# Altium footprint library asar_feather.PcbLib: 53 footprints (part 3 of 4)
Each footprint in its own frame and in the unit in brackets; x right, y up, seen from the top. Pads: shape width x height; smd on the part's side, far side on the other; paste and mask are expansions set on the pad; w line width, h text height; cw(c..) or ccw(c..) is an arc to the next point about the centre after c.
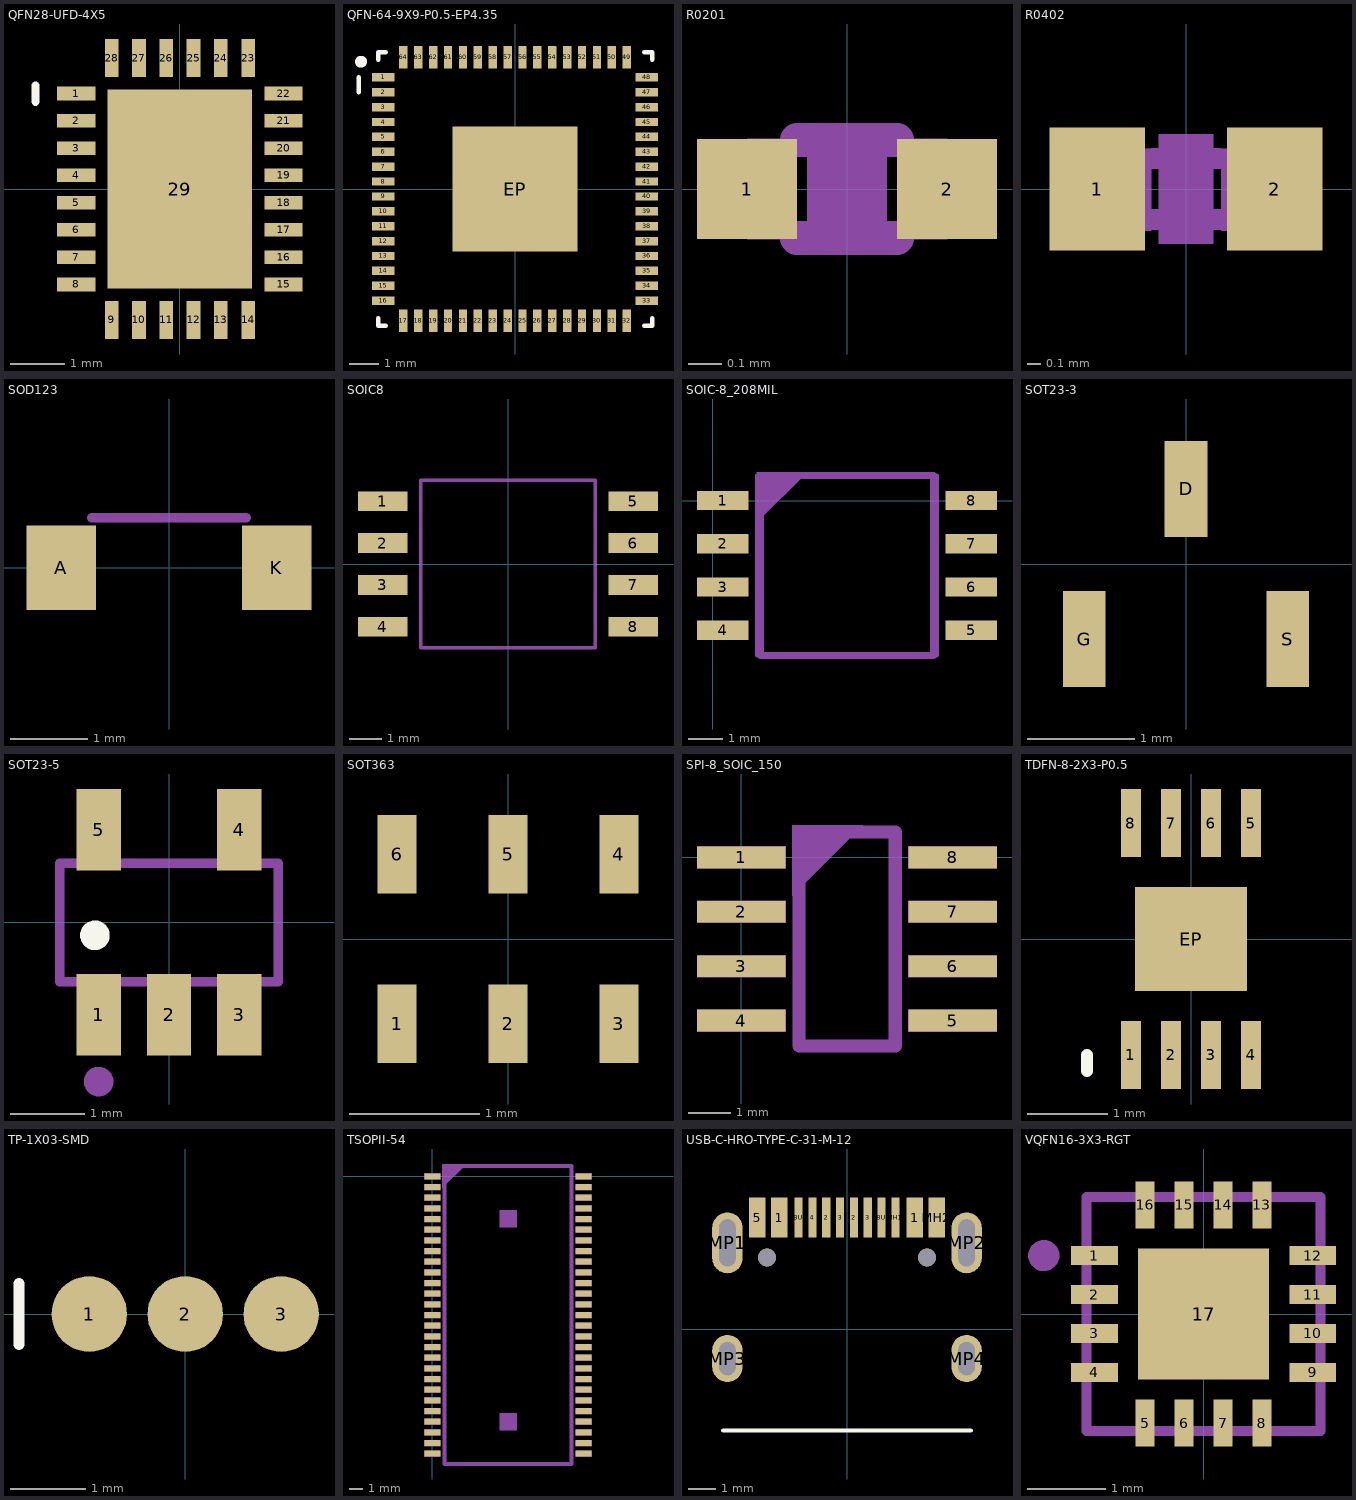
[diagram p2: the footprints below, top view; thin cyan lines are the x and y axes]

## QFN28-UFD-4X5 [mm] "UFD 28-lead QFN 4 x 5 mm, 0.5 pitch, exposed pad 2.65 x 3.65 (pad 29 = GND); LTC DWG 05-08-1712 Rev B recommended pads"
height 0.75
pads (29):
  rect 0.7x0.25 smd: 1(-1.9,1.75) 2(-1.9,1.25) 3(-1.9,0.75) 4(-1.9,0.25) 5(-1.9,-0.25) 6(-1.9,-0.75) 7(-1.9,-1.25) 8(-1.9,-1.75) 15(1.9,-1.75) 16(1.9,-1.25) 17(1.9,-0.75) 18(1.9,-0.25) 19(1.9,0.25) 20(1.9,0.75) 21(1.9,1.25) 22(1.9,1.75)
  rect 0.25x0.7 smd: 9(-1.25,-2.4) 10(-0.75,-2.4) 11(-0.25,-2.4) 12(0.25,-2.4) 13(0.75,-2.4) 14(1.25,-2.4) 23(1.25,2.4) 24(0.75,2.4) 25(0.25,2.4) 26(-0.25,2.4) 27(-0.75,2.4) 28(-1.25,2.4)
  rect 2.65x3.65 smd: 29(0,0)
Top Overlay:
  lines w0.15: -2.65,1.6 -2.65,1.9
3D body: height 0.8, standoff 0, extent -2,-2.5 2,2.5

## QFN-64-9X9-P0.5-EP4.35 [mm] "FT2232HQ QFN-64 9x9 mm 0.5 mm pitch, EP 4.35 mm"
pads (65):
  rect 0.75x0.28 smd: 1(-4.425,3.75) 2(-4.425,3.25) 3(-4.425,2.75) 4(-4.425,2.25) 5(-4.425,1.75) 6(-4.425,1.25) 7(-4.425,0.75) 8(-4.425,0.25) 9(-4.425,-0.25) 10(-4.425,-0.75) 11(-4.425,-1.25) 12(-4.425,-1.75) 13(-4.425,-2.25) 14(-4.425,-2.75) 15(-4.425,-3.25) 16(-4.425,-3.75) 33(4.425,-3.75) 34(4.425,-3.25) 35(4.425,-2.75) 36(4.425,-2.25) 37(4.425,-1.75) 38(4.425,-1.25) 39(4.425,-0.75) 40(4.425,-0.25) 41(4.425,0.25) 42(4.425,0.75) 43(4.425,1.25) 44(4.425,1.75) 45(4.425,2.25) 46(4.425,2.75) 47(4.425,3.25) 48(4.425,3.75)
  rect 0.28x0.75 smd: 17(-3.75,-4.425) 18(-3.25,-4.425) 19(-2.75,-4.425) 20(-2.25,-4.425) 21(-1.75,-4.425) 22(-1.25,-4.425) 23(-0.75,-4.425) 24(-0.25,-4.425) 25(0.25,-4.425) 26(0.75,-4.425) 27(1.25,-4.425) 28(1.75,-4.425) 29(2.25,-4.425) 30(2.75,-4.425) 31(3.25,-4.425) 32(3.75,-4.425) 49(3.75,4.425) 50(3.25,4.425) 51(2.75,4.425) 52(2.25,4.425) 53(1.75,4.425) 54(1.25,4.425) 55(0.75,4.425) 56(0.25,4.425) 57(-0.25,4.425) 58(-0.75,4.425) 59(-1.25,4.425) 60(-1.75,4.425) 61(-2.25,4.425) 62(-2.75,4.425) 63(-3.25,4.425) 64(-3.75,4.425)
  rect 4.2x4.2 smd: EP(0,0)
Top Overlay:
  circle w0.2: c-5.175,4.275 r0.1
  lines w0.15: -5.25,3.25 -5.25,3.75 ; -4.6,-4.34 -4.6,-4.6 -4.34,-4.6 ; -4.6,4.34 -4.6,4.6 -4.34,4.6 ; 4.34,-4.6 4.6,-4.6 4.6,-4.34 ; 4.34,4.6 4.6,4.6 4.6,4.34
3D body: height 0.9, standoff 0, extent -4.5,-4.5 4.5,4.5

## R0201 [mm] "R0201"
pads (2):
  rect 0.3x0.3 smd: 1(-0.3,0) 2(0.3,0)
Mechanical 3:
  region: -0.3,-0.15 -0.3,0.15 -0.15,0.15 -0.15,-0.15
  region: 0.15,-0.15 0.15,0.15 0.3,0.15 0.3,-0.15
  lines w0.102: -0.15,-0.147 0.15,-0.147 ; -0.15,0.147 0.15,0.147
Top Glue Points:
  region: -0.12,-0.15 -0.12,0.15 0.12,0.15 0.12,-0.15
3D body: height 0.26, standoff 0, extent -0.3,-0.15 0.3,0.15

## R0402 [mm] "R0402"
pads (2):
  rect 0.7x0.9 smd: 1(-0.65,0) 2(0.65,0)
Mechanical 4:
  region: -0.554,-0.305 -0.554,0.295 -0.254,0.295 -0.254,-0.305
  region: 0.259,-0.305 0.259,0.295 0.559,0.295 0.559,-0.305
  lines w0.152: -0.245,-0.224 0.245,-0.224 ; -0.245,0.224 0.245,0.224
Bottom Glue Points:
  region: -0.2,-0.4 -0.2,0.4 0.2,0.4 0.2,-0.4
3D body: height 0.4, standoff 0, extent -0.5,-0.25 0.5,0.25

## SOD123 [mm] "SOD123"
pads (2):
  rect 0.9x1.1 smd: A(-1.4,0) K(1.4,0)
Mechanical 8:
  lines w0.127: -1,0.65 1,0.65

## SOIC8 [mm] "SOIC8"
pads (8):
  rect 1.5x0.6 smd: 1(-3.81,1.905) 2(-3.81,0.635) 3(-3.81,-0.635) 4(-3.81,-1.905) 5(3.81,1.905) 6(3.81,0.635) 7(3.81,-0.635) 8(3.81,-1.905)
Mechanical 8:
  lines w0.1: -2.65,-2.55 2.65,-2.55 2.65,2.55 -2.65,2.55 -2.65,-2.55

## SOIC-8_208MIL [mm] "SOIC-8_208MIL"
pads (8):
  rect 1.51x0.56 smd: 1(0.299,0) 2(0.299,-1.27) 3(0.299,-2.54) 4(0.299,-3.81) 5(7.599,-3.81) 6(7.599,-2.54) 7(7.599,-1.27) 8(7.599,0)
Mechanical 4:
  region: -0.001,-0.21 -0.001,0.21 0.649,0.21 0.649,-0.21
  region: -0.001,-1.48 -0.001,-1.06 0.649,-1.06 0.649,-1.48
  region: -0.001,-2.75 -0.001,-2.33 0.649,-2.33 0.649,-2.75
  region: -0.001,-4.02 -0.001,-3.6 0.649,-3.6 0.649,-4.02
  region: 7.249,-4.02 7.249,-3.6 7.899,-3.6 7.899,-4.02
  region: 7.249,-2.75 7.249,-2.33 7.899,-2.33 7.899,-2.75
  region: 7.249,-1.48 7.249,-1.06 7.899,-1.06 7.899,-1.48
  region: 7.249,-0.21 7.249,0.21 7.899,0.21 7.899,-0.21
  lines w0.127: 1.31,-4.545 1.31,0.735 6.59,0.735 6.59,-4.545 1.31,-4.545
Mechanical 8:
  region: 1.305,0.837 1.305,-0.634 2.776,0.837
  lines w0.203: 1.406,-4.545 1.406,0.735 6.493,0.735 6.493,-4.545 1.406,-4.545

## SOT23-3 [mm] "SOT23-3"
pads (3):
  rect 0.4x0.9 smd: D(0,0.7) G(-0.95,-0.7) S(0.95,-0.7)

## SOT23-5 [mm] "SOT23-5"
pads (5):
  rect 0.6x1.1 smd: 1(-0.95,-1.25) 2(0,-1.25) 3(0.95,-1.25) 4(0.95,1.25) 5(-0.95,1.25)
Top Overlay:
  circle w0.2: c-1,-0.175 r0.1
Mechanical 3:
  lines w0.127: -1.475,-0.8 1.475,-0.8 1.475,0.8 -1.475,0.8 -1.475,-0.8
Mechanical 7:
  circle w0.2: c-0.95,-2.15 r0.1
  lines w0.127: -1.475,-0.8 -1.475,0.8 ; -0.437,0.8 0.437,0.8 ; 1.475,-0.8 1.475,0.8
3D body: height 1.45, standoff 0, extent -1.45,-0.8 1.45,0.8

## SOT363 [mm] "SOT363"
pads (6):
  rect 0.3x0.6 smd: 1(-0.85,-0.65) 2(0,-0.65) 3(0.85,-0.65) 4(0.85,0.65) 5(0,0.65) 6(-0.85,0.65)

## SPI-8_SOIC_150 [mil] "SPI-8_SOIC_150"
pads (8):
  rect 81.5x20.08 smd: 1(0,0) 2(0,-50) 3(0,-100) 4(0,-150) 5(194.09,-150) 6(194.09,-100) 7(194.09,-50) 8(194.09,0)
Mechanical 3:
  region: -40.75,-10.04 -40.75,10.04 40.75,10.04 40.75,-10.04
  region: -40.75,-60.04 -40.75,-39.96 40.75,-39.96 40.75,-60.04
  region: -40.75,-110.04 -40.75,-89.96 40.75,-89.96 40.75,-110.04
  region: -40.75,-160.04 -40.75,-139.96 40.75,-139.96 40.75,-160.04
  region: 153.35,-160.04 153.35,-139.96 234.84,-139.96 234.84,-160.04
  region: 153.35,-110.04 153.35,-89.96 234.84,-89.96 234.84,-110.04
  region: 153.35,-60.04 153.35,-39.96 234.84,-39.96 234.84,-60.04
  region: 153.35,-10.04 153.35,10.04 234.84,10.04 234.84,-10.04
Mechanical 7:
  region: 46.75,29.43 46.75,-35.36 111.54,29.43
  lines w12: 52.75,-173.43 52.75,23.43 141.35,23.43 141.35,-173.43 52.75,-173.43

## TDFN-8-2X3-P0.5 [mm] "93LC46B EEPROM TDFN-8 2x3 mm 0.5 mm pitch (MN), EP no net"
pads (9):
  rect 0.25x0.85 smd: 1(-0.75,-1.45) 2(-0.25,-1.45) 3(0.25,-1.45) 4(0.75,-1.45) 5(0.75,1.45) 6(0.25,1.45) 7(-0.25,1.45) 8(-0.75,1.45)
  rect 1.4x1.3 smd: EP(0,0)
Top Overlay:
  lines w0.15: -1.3,-1.65 -1.3,-1.45
3D body: height 0.8, standoff 0, extent -1,-1.5 1,1.5

## TP-1X03-SMD [mm] "Three 1.0 mm SMD test pads, 1.27 mm pitch"
pads (3):
  round 1 smd: 1(-1.27,0) 2(0,0) 3(1.27,0)
Top Overlay:
  lines w0.15: -2.2,-0.4 -2.2,0.4

## TSOPII-54 [mm] "TSOPII-54"
pads (54):
  rect 1.2x0.45 smd: 1(0,0) 2(0,-0.8) 3(0,-1.6) 4(0,-2.4) 5(0,-3.2) 6(0,-4) 7(0,-4.8) 8(0,-5.6) 9(0,-6.4) 10(0,-7.2) 11(0,-8) 12(0,-8.8) 13(0,-9.6) 14(0,-10.4) 15(0,-11.2) 16(0,-12) 17(0,-12.8) 18(0,-13.6) 19(0,-14.4) 20(0,-15.2) 21(0,-16) 22(0,-16.8) 23(0,-17.6) 24(0,-18.4) 25(0,-19.2) 26(0,-20) 27(0,-20.8) 28(11.36,-20.8) 29(11.36,-20) 30(11.36,-19.2) 31(11.36,-18.4) 32(11.36,-17.6) 33(11.36,-16.8) 34(11.36,-16) 35(11.36,-15.2) 36(11.36,-14.4) 37(11.36,-13.6) 38(11.36,-12.8) 39(11.36,-12) 40(11.36,-11.2) 41(11.36,-10.4) 42(11.36,-9.6) 43(11.36,-8.8) 44(11.36,-8) 45(11.36,-7.2) 46(11.36,-6.4) 47(11.36,-5.6) 48(11.36,-4.8) 49(11.36,-4) 50(11.36,-3.2) 51(11.36,-2.4) 52(11.36,-1.6) 53(11.36,-0.8) 54(11.36,0)
Mechanical 4:
  drawing of 108 lines, arcs and shapes, not listed
Mechanical 8:
  region: 0.752,0.927 0.752,-0.863 2.543,0.927
  region: 0.752,0.927 0.752,-0.863 2.543,0.927
  lines w0.305: 0.905,-21.575 0.905,0.775 10.455,0.775 10.455,-21.575 0.905,-21.575
Bottom Glue Points:
  region: 5.08,-3.81 5.08,-2.54 6.35,-2.54 6.35,-3.81
  region: 5.08,-19.05 5.08,-17.78 6.35,-17.78 6.35,-19.05

## USB-C-HRO-TYPE-C-31-M-12 [mm] "USB-C receptacle USB 2.0, HRO TYPE-C-31-M-12; board edge at Y = -3.65"
pads (18):
  rect 0.6x1.45 smd: 1(-2.45,4.045) 1(2.45,4.045) 5(-3.25,4.045) MH2(3.25,4.045)
  rect 0.3x1.45 smd: 2(-0.75,4.045) 2(0.25,4.045) 3(-0.25,4.045) 3(0.75,4.045) 4(-1.25,4.045) MH1(1.75,4.045) SBU1(1.25,4.045) SBU2(-1.75,4.045)
  oval 1.1x2.2 hole 0.6 slot 1.7 at 90 deg: MP1(-4.32,3.13) MP2(4.32,3.13)
  oval 1.1x1.7 hole 0.6 slot 1.2 at 90 deg: MP3(-4.32,-1.05) MP4(4.32,-1.05)
  round 0.65 hole 0.65 unplated: ""(-2.89,2.6) ""(2.89,2.6)
Top Overlay:
  lines w0.15: -4.47,-3.65 4.47,-3.65

## VQFN16-3X3-RGT [mm] "VQFN16-3X3-RGT"
pads (17):
  rect 0.6x0.24 smd: 1(-1.4,0.75) 2(-1.4,0.25) 3(-1.4,-0.25) 4(-1.4,-0.75) 9(1.4,-0.75) 10(1.4,-0.25) 11(1.4,0.25) 12(1.4,0.75)
  rect 0.24x0.6 smd: 5(-0.75,-1.4) 6(-0.25,-1.4) 7(0.25,-1.4) 8(0.75,-1.4) 13(0.75,1.4) 14(0.25,1.4) 15(-0.25,1.4) 16(-0.75,1.4)
  rect 1.68x1.68 smd: 17(0,0)
Mechanical 3:
  lines w0.127: -1.5,-1.5 1.5,-1.5 1.5,1.5 -1.5,1.5 -1.5,-1.5
Mechanical 7:
  circle w0.2: c-2.05,0.75 r0.1
  lines w0.127: -1.5,-1.084 -1.5,-1.5 -1.084,-1.5 ; -1.5,1.084 -1.5,1.5 -1.084,1.5 ; 1.084,-1.5 1.5,-1.5 1.5,-1.084 ; 1.084,1.5 1.5,1.5 1.5,1.084